# EAGLE library part 131M61 (library 131M61)
IC: interface; digital isolator; 10Mbps; iDivider; 35.5VDC; SMD Source: Datasheet <https://www.rpsemi.com/d.php?id=1593>
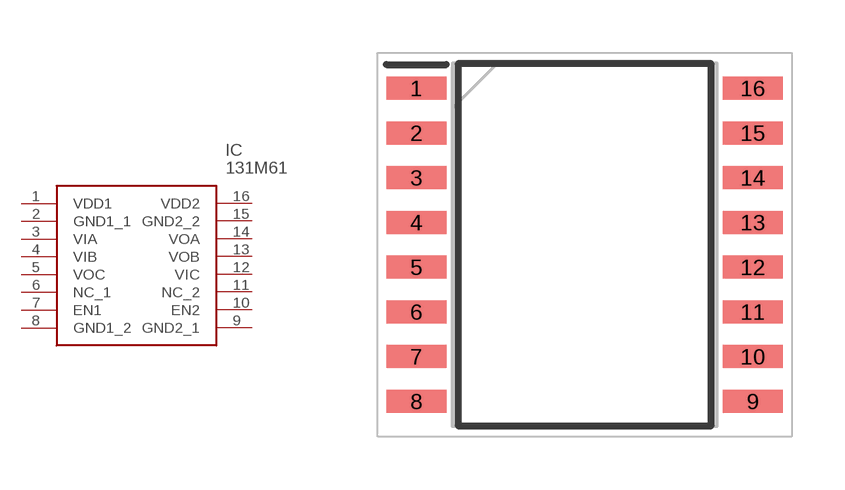
[diagram p0: symbol with the pads of SOIC127P1030X265-16N; footprint SOIC127P1030X265-16N]

Designator prefix IC

## 131M61 (Description: IC: interface; digital isolator; 10Mbps; iDivider; 35.5VDC; SMD; Height: 2.65mm; Manufacturer_Name: 2Pai Semi; Manufacturer_Part_Number: 131M61)  [SOIC127P1030X265-16N]
1  VDD1
2  GND1_1
3  VIA
4  VIB
5  VOC
6  NC_1
7  EN1
8  GND1_2
9  GND2_1
10  EN2
11  NC_2
12  VIC
13  VOB
14  VOA
15  GND2_2
16  VDD2

## Footprint SOIC127P1030X265-16N (pad centres in mm)
WB SOIC-16_2025
smd 1.7 x 0.65: 1 -4.775,4.445; 2 -4.775,3.175; 3 -4.775,1.905; 4 -4.775,0.635; 5 -4.775,-0.635; 6 -4.775,-1.905; 7 -4.775,-3.175; 8 -4.775,-4.445; 9 4.775,-4.445; 10 4.775,-3.175; 11 4.775,-1.905; 12 4.775,-0.635; 13 4.775,0.635; 14 4.775,1.905; 15 4.775,3.175; 16 4.775,4.445